# Altium footprint library STM32WL_RevA.PcbLib: 30 footprints (part 1 of 2)
Each footprint in its own frame and in the unit in brackets; x right, y up, seen from the top. Pads: shape width x height; smd on the part's side, far side on the other; paste and mask are expansions set on the pad; w line width, h text height; cw(c..) or ccw(c..) is an arc to the next point about the centre after c.
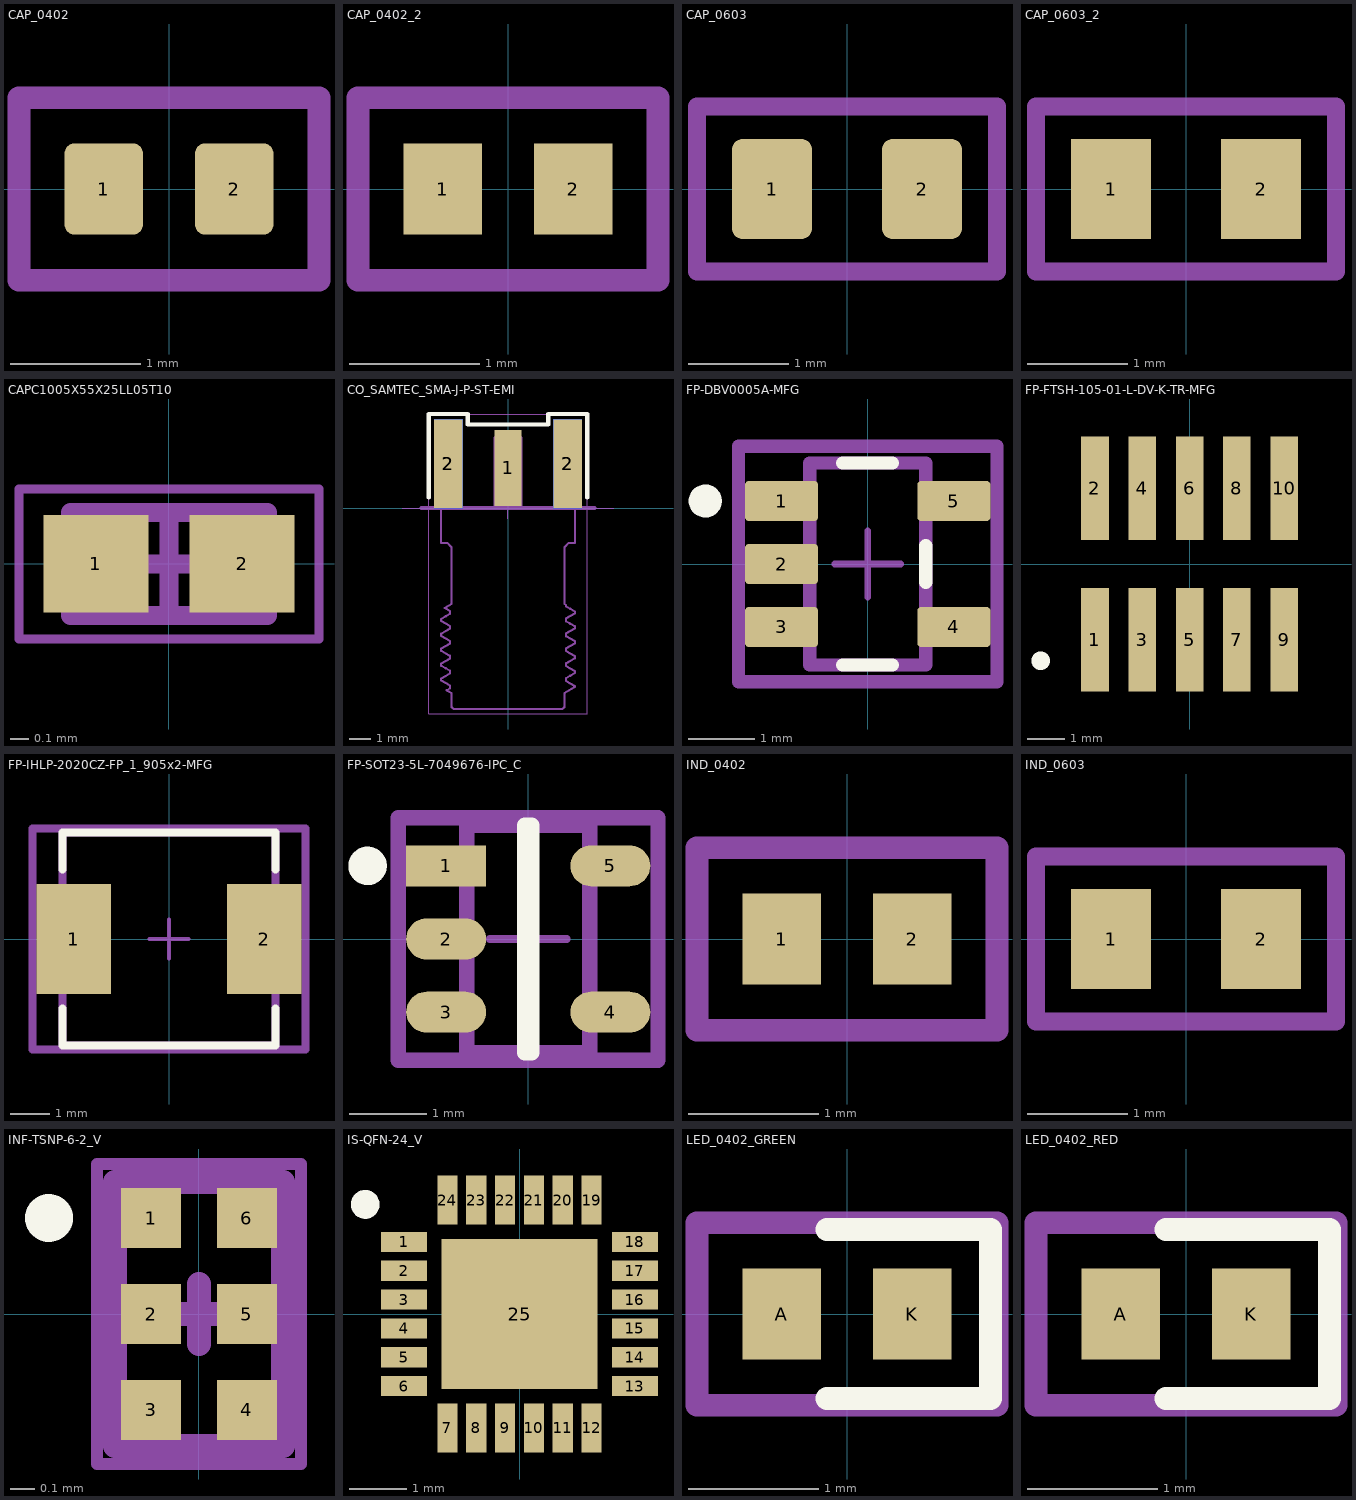
[diagram p0: the footprints below, top view; thin cyan lines are the x and y axes]

## CAP_0402 [mm]
pads (2):
  rrect25% 0.6x0.7 smd: 1(-0.5,0) 2(0.5,0)
Top 3D Body:
  lines w0.175: -1.15,-0.7 1.15,-0.7 1.15,0.7 -1.15,0.7 -1.15,-0.7
  text "'.Designator'" at -5.665,-0.29 h1
3D body "C0402.step": height 0.37, standoff 0.01, extent -0.5,-0.265 0.5,0.265

## CAP_0402_2 [mm]
pads (2):
  rect 0.6x0.7 smd: 1(-0.5,0) 2(0.5,0)
Top 3D Body:
  lines w0.175: -1.15,-0.7 -1.15,0.7 1.15,0.7 1.15,-0.7 -1.15,-0.7
  text "'.Designator'" at -5.665,-0.29 h1
3D body "C0402.step": height 0.37, standoff 0.01, extent -0.5,-0.265 0.5,0.265

## CAP_0603 [mm]
pads (2):
  rrect25% 0.8x1 smd: 1(-0.75,0) 2(0.75,0)
Top 3D Body:
  lines w0.175: -1.5,-0.825 1.5,-0.825 1.5,0.825 -1.5,0.825 -1.5,-0.825
  text "'.Designator'" at -5.665,-0.417 h1
3D body "C0603.step": height 0.51, standoff 0.01, extent -0.8,-0.4 0.8,0.4

## CAP_0603_2 [mm]
pads (2):
  rect 0.8x1 smd: 1(-0.75,0) 2(0.75,0)
Top 3D Body:
  lines w0.175: -1.5,-0.825 -1.5,0.825 1.5,0.825 1.5,-0.825 -1.5,-0.825
  text "'.Designator'" at -5.665,-0.417 h1
3D body "C0603.step": height 0.51, standoff 0.01, extent -0.8,-0.4 0.8,0.4

## CAPC1005X55X25LL05T10 [mm] "Chip Capacitor, 2-Leads, Body 1.00x0.50mm, IPC High Density"
height 0.55
pads (2):
  rect 0.56x0.52 smd: 1(-0.39,0) 2(0.39,0)
Top 3D Body:
  lines w0.1: -0.525,-0.275 -0.525,0.275 0.525,0.275 0.525,-0.275 -0.525,-0.275
Top Courtyard:
  lines w0.05: -0.8,-0.4 -0.8,0.4 0.8,0.4 0.8,-0.4 -0.8,-0.4
  lines w0.1: -0.275,0 0.275,0 ; 0,-0.275 0,0.275
3D body: height 0.55, standoff 0, extent -0.275,-0.275 0.275,0.275
3D body: height 0.55, standoff 0, extent -0.525,-0.275 -0.275,0.275
3D body: height 0.55, standoff 0, extent 0.275,-0.275 0.525,0.275

## CO_SAMTEC_SMA-J-P-ST-EMI [mm] "SMA Jack CMS, Edge Mountt Receptacle 50Ohm, 5-Leads, Body 6.35x6.35x9.52mm, pitch 2.825mm"
height 6.35
pads (5):
  rect 1.27x3.6 smd mask+0.05: 1(0,1.9)
  rect 1.35x4.2 smd mask+0.05: 2(-2.825,2.1) 2(2.825,2.1)
  rect 1.35x4.2 smd far side mask+0.05: 2(-2.825,2.1) 2(2.825,2.1)
Top Overlay:
  lines w0.2: -3.75,0.5 -3.75,4.45 -1.9,4.45 -1.9,3.95 1.9,3.95 1.9,4.45 3.75,4.45 3.75,0.5
Top Assembly:
  lines w0.1: -3.164,-8.074 -3.164,-8.162 -3.15,-8.169 ; -3.164,-7.369 -3.164,-7.456 -3.15,-7.464 ; -3.164,-6.663 -3.164,-6.751 -3.15,-6.758 ; -3.164,-5.958 -3.164,-6.045 -3.151,-6.052 ; -3.164,-5.252 -3.164,-5.34 -3.152,-5.346 ; -3.158,-6.052 -2.948,-6.173 -2.744,-6.291 ; -3.159,-5.951 -2.949,-5.829 -2.739,-5.708 ; -3.159,-5.346 -2.949,-5.468 -2.744,-5.586 ; -3.158,-5.245 -2.948,-5.124 -2.738,-5.002 ; -3.157,-8.169 -2.947,-8.291 -2.744,-8.408 ; -3.157,-8.067 -2.947,-7.945 -2.737,-7.823 ; -3.157,-7.464 -2.947,-7.585 -2.744,-7.703 ; -3.157,-7.361 -2.947,-7.24 -2.737,-7.118 ; -3.157,-6.758 -2.947,-6.88 -2.744,-6.997 ; -3.157,-6.656 -2.947,-6.534 -2.737,-6.413 ; -2.992,-4.737 -2.947,-4.763 -2.744,-4.88 ; -2.991,-4.732 -2.675,-4.55 -2.675,-1.85 -2.875,-1.65 -3.175,-1.65 -3.175,0 -3.175,3.81 -2.365,3.81 -2.365,0 -0.635,0 -0.635,3.335 -0.335,3.635 0,3.635 0.335,3.635 0.635,3.335 0.635,0 2.365,0 2.365,3.81 3.175,3.81 3.175,0 3.175,-1.65 2.875,-1.65 2.675,-1.85 2.675,-4.55 2.744,-4.59 2.744,-4.653 2.947,-4.77 3.157,-4.892 ; -2.9,-8.63 -2.675,-8.76 -2.675,-9.42 -2.575,-9.52 0,-9.52 2.575,-9.52 2.675,-9.42 2.675,-8.76 3.164,-8.478 3.164,-8.427 3.152,-8.42 ; -2.901,-8.624 -2.737,-8.529 ; -2.744,-8.533 -2.744,-8.404 ; -2.744,-7.828 -2.744,-7.698 ; -2.744,-7.122 -2.744,-6.993 ; -2.744,-6.417 -2.744,-6.287 ; -2.744,-5.711 -2.744,-5.582 ; -2.744,-5.006 -2.744,-4.876 ; 2.737,-7.354 2.947,-7.232 3.157,-7.111 ; 2.737,-6.649 2.947,-6.527 3.157,-6.406 ; 2.737,-5.943 2.947,-5.822 3.157,-5.7 ; 2.737,-5.237 2.947,-5.116 3.157,-4.994 ; 2.739,-8.059 2.949,-7.937 3.159,-7.816 ; 2.744,-8.185 2.744,-8.055 ; 2.744,-8.181 2.949,-8.299 3.159,-8.42 ; 2.744,-7.479 2.744,-7.35 ; 2.744,-7.475 2.948,-7.593 3.158,-7.715 ; 2.744,-6.774 2.744,-6.644 ; 2.744,-6.77 2.947,-6.887 3.157,-7.008 ; 2.744,-6.068 2.744,-5.939 ; 2.744,-6.064 2.947,-6.181 3.157,-6.303 ; 2.744,-5.363 2.744,-5.233 ; 2.744,-5.358 2.947,-5.476 3.157,-5.597 ; 3.15,-7.008 3.164,-7.016 3.164,-7.104 ; 3.15,-6.303 3.164,-6.31 3.164,-6.398 ; 3.15,-5.597 3.164,-5.605 3.164,-5.692 ; 3.151,-7.715 3.164,-7.721 3.164,-7.809 ; 3.151,-4.892 3.164,-4.899 3.164,-4.987
  text ".Designator" at 4.25,2.8 h1.25
Mechanical 10:
  lines w0.2: -4.1,0 4.1,0
  text "Edge of PCB" at -2,-0.825 h0.8
Top Component Center:
  lines w0.01: -5,0 5,0
Mechanical 17:
  lines w0.05: -0.5,0 0.5,0 ; 0,-0.5 0,0.5 ; 3.73,4.43 -3.75,4.43 -3.75,-9.75 3.75,-9.75 3.75,4.43
3D body "SAMTEC_SMA-J-P-H-ST-EM1.stp": height 3.8, standoff -2.55, extent -3.175,-10.133 3.175,3.197

## FP-DBV0005A-MFG [mm]
pads (5):
  rrect17% 1.1x0.6 smd paste+0 mask+0: 1(-1.3,0.95) 2(-1.3,0) 3(-1.3,-0.95) 4(1.3,-0.95) 5(1.3,0.95)
Top Overlay:
  circle w0.25: c-2.45,0.95 r0.125
  lines w0.2: -0.375,-1.525 0.375,-1.525 ; -0.375,1.525 0.375,1.525 ; 0.875,-0.275 0.875,0.275
Top Assembly:
  lines w0.2: -1.95,-1.775 1.95,-1.775 1.95,1.775 -1.95,1.775 -1.95,-1.775
  text ".Designator" at 0,-0.001 h1
Top 3D Body:
  lines w0.2: -0.875,-1.525 0.875,-1.525 0.875,1.525 -0.875,1.525 -0.875,-1.525
Top Courtyard:
  lines w0.2: -1.95,-1.775 1.95,-1.775 1.95,1.775 -1.95,1.775 -1.95,-1.775
Top Component Center:
  lines w0.1: -0.5,0 0.5,0 ; 0,-0.5 0,0.5
3D body "IC_Texas_Instruments_SN65LVDT2DBVT_eec.STEP": height 0.25, standoff 0, extent -1.95,-1.775 1.95,1.775

## FP-FTSH-105-01-L-DV-K-TR-MFG [mm]
pads (10):
  rect 0.74x2.79 smd paste+0 mask+0: 1(-2.54,-2.035) 2(-2.54,2.035) 3(-1.27,-2.035) 4(-1.27,2.035) 5(0,-2.035) 6(0,2.035) 7(1.27,-2.035) 8(1.27,2.035) 9(2.54,-2.035) 10(2.54,2.035)
Top Overlay:
  circle w0.25: c-4,-2.6 r0.125
Top Assembly:
  text ".Designator" at 0,-0.001 h1
3D body "Conn_Samtec_FTSH-105-01-L-DV-K-TR_eec.STEP": height 0.25, standoff 0, extent -3.34,-3.53 3.34,3.53

## FP-IHLP-2020CZ-FP_1_905x2-MFG [mm]
pads (2):
  rect 1.905x2.79 smd paste+0 mask+0: 1(-2.425,0) 2(2.425,0)
Top Overlay:
  lines w0.2: -2.717,-1.77 -2.717,-2.717 2.717,-2.717 2.717,-1.77 ; -2.717,1.77 -2.717,2.717 2.717,2.717 2.717,1.77
Top Assembly:
  lines w0.2: -3.478,-2.817 -3.478,2.817 3.478,2.817 3.478,-2.817 -3.478,-2.817
  text ".Designator" at 0,0.188 h1
Top 3D Body:
  lines w0.2: -2.717,-2.717 -2.717,2.717 2.717,2.717 2.717,-2.717 -2.717,-2.717
Top Courtyard:
  lines w0.2: -3.478,-2.817 -3.478,2.817 3.478,2.817 3.478,-2.817 -3.478,-2.817
Top Component Center:
  lines w0.1: -0.5,0 0.5,0 ; 0,-0.5 0,0.5
3D body "Ind_Vishay_IHLP2020CZERR47M5A_eec.STEP": height 0.25, standoff 0, extent -3.478,-2.817 3.478,2.817

## FP-SOT23-5L-7049676-IPC_C [mm]
pads (5):
  rect 1.038x0.532 smd paste+0 mask+0: 1(-1.066,0.95)
  rrect100% 1.038x0.532 smd paste+0 mask+0: 2(-1.066,0) 3(-1.066,-0.95) 4(1.066,-0.95) 5(1.066,0.95)
Top Overlay:
  circle w0.25: c-2.085,0.95 r0.125
  lines w0.2: -0.047,-1.475 0.047,-1.475 0.047,1.475 -0.047,1.475 -0.047,-1.475
Top Assembly:
  lines w0.2: -1.685,-1.575 1.685,-1.575 1.685,1.575 -1.685,1.575 -1.685,-1.575
  text ".Designator" at 0,0.188 h1
Top 3D Body:
  lines w0.2: -0.8,-1.475 0.8,-1.475 0.8,1.475 -0.8,1.475 -0.8,-1.475
Top Courtyard:
  lines w0.2: -1.685,-1.575 1.685,-1.575 1.685,1.575 -1.685,1.575 -1.685,-1.575
Top Component Center:
  lines w0.1: -0.5,0 0.5,0 ; 0,-0.5 0,0.5
3D body "IC_STMicroelectronics_LD3985M33R_eec.STEP": height 0.25, standoff 0, extent -1.685,-1.575 1.685,1.575

## IND_0402 [mm]
pads (2):
  rect 0.6x0.7 smd: 1(-0.5,0) 2(0.5,0)
Top 3D Body:
  lines w0.175: -1.15,-0.7 1.15,-0.7 1.15,0.7 -1.15,0.7 -1.15,-0.7
  text "'.Designator'" at -5.665,-0.417 h1
3D body "L0402.step": height 0.67, standoff 0.01, extent -0.56,-0.256 0.56,0.256

## IND_0603 [mm]
pads (2):
  rect 0.8x1 smd: 1(-0.75,0) 2(0.75,0)
Top 3D Body:
  lines w0.175: -1.5,-0.825 -1.5,0.825 1.5,0.825 1.5,-0.825 -1.5,-0.825
  text "'.Designator'" at -5.665,-0.417 h1
3D body "L0603.step": height 0.87, standoff 0.01, extent -0.81,-0.365 0.81,0.365

## INF-TSNP-6-2_V [mm] "TSNP, 6-Leads, Body 1.1x0.7mm, Pitch 0.4mm"
height 0.4
pads (6):
  rect 0.25x0.25 smd: 1(-0.2,0.4) 2(-0.2,0) 3(-0.2,-0.4) 4(0.2,-0.4) 5(0.2,0) 6(0.2,0.4)
Top Overlay:
  circle w0.1: c-0.625,0.4 r0.05
Top 3D Body:
  lines w0.1: -0.35,-0.55 0.35,-0.55 0.35,0.55 -0.35,0.55 -0.35,-0.55
Top Courtyard:
  lines w0.05: -0.425,-0.625 0.425,-0.625 0.425,0.625 -0.425,0.625 -0.425,-0.625
  lines w0.1: -0.125,0 0.125,0 ; 0,-0.125 0,0.125
3D body: height 0.4, standoff 0, extent -0.349,-0.549 0.349,0.549

## IS-QFN-24_V [mm] "QFN, 24-Leads, Body 4x4mm, Pitch 0.5mm, Thermal Pad 2.7x2.6mm"
height 0.95
pads (25):
  rect 0.8x0.35 smd: 1(-2,1.25) 2(-2,0.75) 3(-2,0.25) 4(-2,-0.25) 5(-2,-0.75) 6(-2,-1.25) 13(2,-1.25) 14(2,-0.75) 15(2,-0.25) 16(2,0.25) 17(2,0.75) 18(2,1.25)
  rect 0.35x0.85 smd mask+0.102: 7(-1.25,-1.975) 8(-0.75,-1.975) 9(-0.25,-1.975) 10(0.25,-1.975) 11(0.75,-1.975) 12(1.25,-1.975) 19(1.25,1.975) 20(0.75,1.975) 21(0.25,1.975) 22(-0.25,1.975) 23(-0.75,1.975) 24(-1.25,1.975)
  rect 2.7x2.6 smd: 25(0,0)
Top Overlay:
  circle w0.25: c-2.675,1.9 r0.125
3D body: height 0.95, standoff 0, extent -1.999,-1.999 1.999,1.999

## LED_0402_GREEN [mm]
pads (2):
  rect 0.6x0.7 smd: A(-0.5,0) K(0.5,0)
Top Overlay:
  lines w0.175: -0.153,-0.647 1.1,-0.647 1.1,0.647 -0.153,0.647
Top 3D Body:
  lines w0.175: -1.15,-0.7 1.15,-0.7 1.15,0.7 -1.15,0.7 -1.15,-0.7
  text "'.Designator'" at -5.665,-0.29 h1
  text "+" at -1.883,0.508 h0.5
3D body "LED0402-Green.step": height 0.45, standoff 0, extent -0.505,-0.25 0.505,0.25

## LED_0402_RED [mm]
pads (2):
  rect 0.6x0.7 smd: A(-0.5,0) K(0.5,0)
Top Overlay:
  lines w0.175: -0.153,-0.647 1.1,-0.647 1.1,0.647 -0.153,0.647
Top 3D Body:
  lines w0.175: -1.15,-0.7 1.15,-0.7 1.15,0.7 -1.15,0.7 -1.15,-0.7
  text "'.Designator'" at -5.665,-0.29 h1
  text "+" at -1.883,0.508 h0.5
3D body "LED0402-Red.step": height 0.45, standoff 0, extent -0.505,-0.25 0.505,0.25